# Altium footprint library Header_Pcb.PcbLib: 49 footprints (part 3 of 4)
Each footprint in its own frame and in the unit in brackets; x right, y up, seen from the top. Pads: shape width x height; smd on the part's side, far side on the other; paste and mask are expansions set on the pad; w line width, h text height; cw(c..) or ccw(c..) is an arc to the next point about the centre after c.
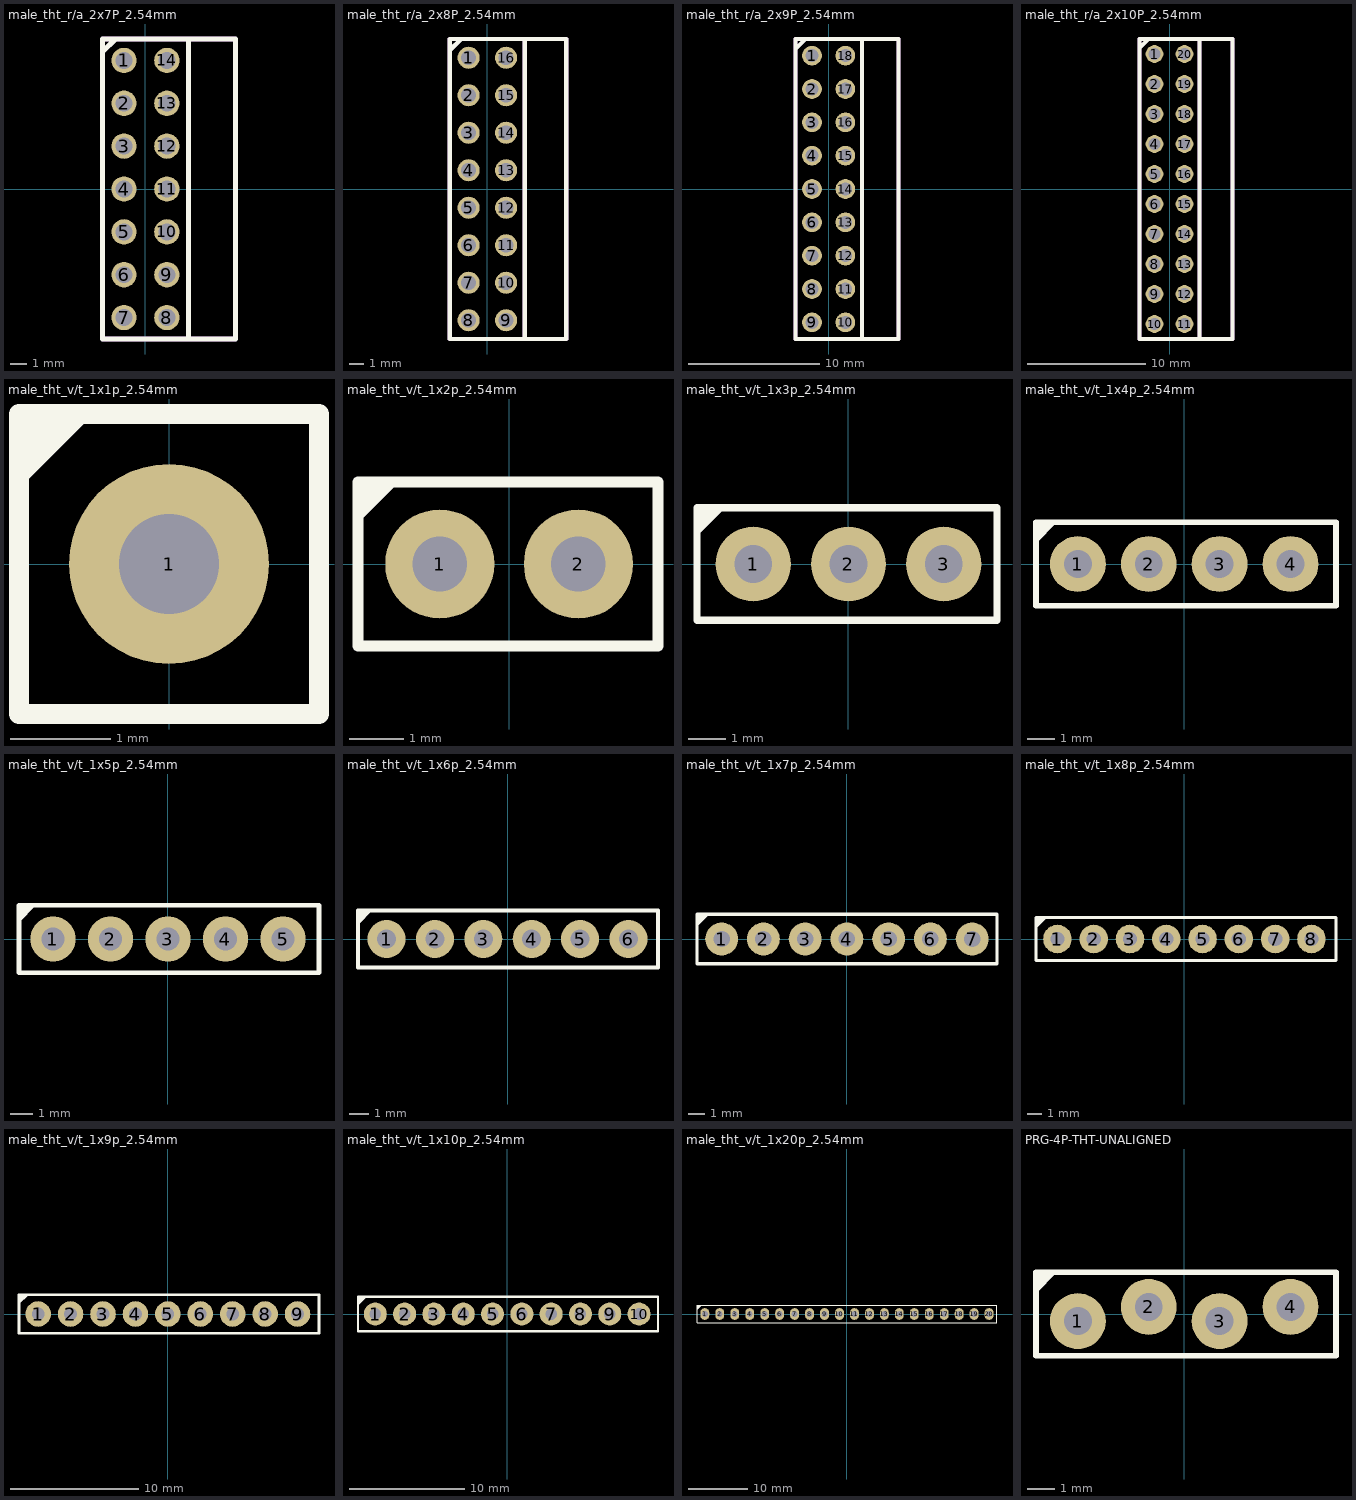
[diagram p2: the footprints below, top view; thin cyan lines are the x and y axes]

## male_tht_r/a_2x7P_2.54mm [mm]
pads (14):
  round 1.5 hole 1: 1(-1.27,7.62) 2(-1.27,5.08) 3(-1.27,2.54) 4(-1.27,0) 5(-1.27,-2.54) 6(-1.27,-5.08) 7(-1.27,-7.62) 8(1.27,-7.62) 9(1.27,-5.08) 10(1.27,-2.54) 11(1.27,0) 12(1.27,2.54) 13(1.27,5.08) 14(1.27,7.62)
Top Overlay:
  lines w0.3: -2.54,8.128 -1.778,8.89 ; 2.54,-8.89 5.334,-8.89 5.334,8.89 2.54,8.89 ; 2.54,-8.89 -2.54,-8.89 -2.54,8.89 2.54,8.89 ; 2.54,-8.89 2.54,8.89
Mechanical 13:
  lines w0.3: 2.54,-8.89 2.54,8.89 ; 2.54,8.89 -2.54,8.89 -2.54,-8.89 0,-8.89 5.334,-8.89 5.334,8.89 2.54,8.89
  text ".designator" at 1.078,-3.917 h1.5
3D body "male_90c_2x7P_2.54mm.step": height 6.77, standoff -5.99, extent -2.54,-8.89 5.54,8.89

## male_tht_r/a_2x8P_2.54mm [mm]
pads (16):
  round 1.5 hole 1: 1(-1.27,8.89) 2(-1.27,6.35) 3(-1.27,3.81) 4(-1.27,1.27) 5(-1.27,-1.27) 6(-1.27,-3.81) 7(-1.27,-6.35) 8(-1.27,-8.89) 9(1.27,-8.89) 10(1.27,-6.35) 11(1.27,-3.81) 12(1.27,-1.27) 13(1.27,1.27) 14(1.27,3.81) 15(1.27,6.35) 16(1.27,8.89)
Top Overlay:
  lines w0.3: -2.54,9.398 -1.778,10.16 ; 2.54,-10.16 5.334,-10.16 5.334,10.16 2.54,10.16 ; 2.54,-10.16 -2.54,-10.16 -2.54,10.16 2.54,10.16 ; 2.54,-10.16 2.54,10.16
Mechanical 13:
  lines w0.3: 2.54,-10.16 2.54,10.16 ; 2.54,10.16 -2.54,10.16 -2.54,-10.16 0,-10.16 5.334,-10.16 5.334,10.16 2.54,10.16
  text ".designator" at 1.078,-4.171 h1.5
3D body "male_90c_2x8P_2.54mm.step": height 6.77, standoff -5.99, extent -2.54,-10.16 5.54,10.16

## male_tht_r/a_2x9P_2.54mm [mm]
pads (18):
  round 1.5 hole 1: 1(-1.27,10.16) 2(-1.27,7.62) 3(-1.27,5.08) 4(-1.27,2.54) 5(-1.27,0) 6(-1.27,-2.54) 7(-1.27,-5.08) 8(-1.27,-7.62) 9(-1.27,-10.16) 10(1.27,-10.16) 11(1.27,-7.62) 12(1.27,-5.08) 13(1.27,-2.54) 14(1.27,0) 15(1.27,2.54) 16(1.27,5.08) 17(1.27,7.62) 18(1.27,10.16)
Top Overlay:
  lines w0.3: -2.54,10.668 -1.778,11.43 ; 2.54,-11.43 2.54,11.43 ; 2.54,-11.43 -2.54,-11.43 -2.54,11.43 2.54,11.43 ; 2.54,-11.43 5.334,-11.43 5.334,11.43 2.54,11.43
Mechanical 13:
  lines w0.3: 2.54,-11.43 2.54,11.43 ; 2.54,11.43 5.334,11.43 5.334,-11.43 0,-11.43 -2.54,-11.43 -2.54,11.43 2.54,11.43
  text ".designator" at 1.078,-4.425 h1.5
3D body "male_90c_2x9P_2.54mm.step": height 6.77, standoff -5.99, extent -2.54,-11.43 5.54,11.43

## male_tht_r/a_2x10P_2.54mm [mm]
pads (20):
  round 1.5 hole 1: 1(-1.27,11.43) 2(-1.27,8.89) 3(-1.27,6.35) 4(-1.27,3.81) 5(-1.27,1.27) 6(-1.27,-1.27) 7(-1.27,-3.81) 8(-1.27,-6.35) 9(-1.27,-8.89) 10(-1.27,-11.43) 11(1.27,-11.43) 12(1.27,-8.89) 13(1.27,-6.35) 14(1.27,-3.81) 15(1.27,-1.27) 16(1.27,1.27) 17(1.27,3.81) 18(1.27,6.35) 19(1.27,8.89) 20(1.27,11.43)
Top Overlay:
  lines w0.3: -2.54,11.938 -1.778,12.7 ; 2.54,-12.7 5.334,-12.7 5.334,12.7 2.54,12.7 ; 2.54,-12.7 -2.54,-12.7 -2.54,12.7 2.54,12.7 ; 2.54,-12.7 2.54,12.7
Mechanical 13:
  lines w0.3: 2.54,-12.7 2.54,12.7 ; 2.54,12.7 -2.54,12.7 -2.54,-12.7 0,-12.7 5.334,-12.7 5.334,12.7 2.54,12.7
  text ".designator" at 1.078,-4.425 h1.5
3D body "male_90c_2x10P_2.54mm.step": height 6.77, standoff -5.99, extent -2.54,-12.7 5.54,12.7

## male_tht_v/t_1x1p_2.54mm [mm]
pads (1):
  round 2 hole 1: 1(0,0)
Top Overlay:
  region: -1.5,1.5 -0.75,1.5 -1.5,0.75
  lines w0.2: -1.5,-1.5 -1.5,1.5 1.5,1.5 1.5,-1.5 -1.5,-1.5
3D body "sinle_1p.stp": height 8.55, standoff -2.99, extent -1.27,-1.27 1.27,1.27

## male_tht_v/t_1x2p_2.54mm [mm]
pads (2):
  round 2 hole 1: 1(-1.27,0) 2(1.27,0)
Top Overlay:
  region: -2.77,1.5 -2.02,1.5 -2.77,0.75
  lines w0.2: -2.77,-1.5 2.73,-1.5 2.73,1.5 -2.77,1.5 -2.77,-1.5
3D body "single_2p.stp": height 8.55, standoff -2.99, extent -2.56,-1.27 2.52,1.27

## male_tht_v/t_1x3p_2.54mm [mm]
pads (3):
  round 2 hole 1: 1(-2.54,0) 2(0,0) 3(2.54,0)
Top Overlay:
  region: -4.04,1.5 -3.29,1.5 -4.04,0.75
  lines w0.2: -4.04,-1.5 -4.04,1.5 3.96,1.5 3.96,-1.5 -4.04,-1.5
3D body "single_3p.stp": height 8.55, standoff -2.99, extent -3.81,-1.27 3.81,1.27

## male_tht_v/t_1x4p_2.54mm [mm]
pads (4):
  round 2 hole 1: 1(-3.81,0) 2(-1.27,0) 3(1.27,0) 4(3.81,0)
Top Overlay:
  region: -5.31,1.5 -4.56,1.5 -5.31,0.75
  lines w0.2: -5.31,-1.5 -5.31,1.5 5.44,1.5 5.44,-1.5 -5.31,-1.5
3D body "single_4p.stp": height 8.55, standoff -2.99, extent -5.08,-1.27 5.08,1.27

## male_tht_v/t_1x5p_2.54mm [mm]
pads (5):
  round 2 hole 1: 1(-5.08,0) 2(-2.54,0) 3(0,0) 4(2.54,0) 5(5.08,0)
Top Overlay:
  region: -6.58,1.5 -5.83,1.5 -6.58,0.75
  lines w0.2: -6.58,-1.5 -6.58,1.5 6.67,1.5 6.67,-1.5 -6.58,-1.5
3D body "single_5p.stp": height 8.55, standoff -2.99, extent -6.35,-1.27 6.35,1.27

## male_tht_v/t_1x6p_2.54mm [mm]
pads (6):
  round 2 hole 1: 1(-6.35,0) 2(-3.81,0) 3(-1.27,0) 4(1.27,0) 5(3.81,0) 6(6.35,0)
Top Overlay:
  region: -7.85,1.5 -7.1,1.5 -7.85,0.75
  lines w0.2: -7.85,-1.5 -7.85,1.5 7.9,1.5 7.9,-1.5 -7.85,-1.5
3D body "single_6p.stp": height 8.55, standoff -2.99, extent -7.62,-1.27 7.62,1.27

## male_tht_v/t_1x7p_2.54mm [mm]
pads (7):
  round 2 hole 1: 1(-7.62,0) 2(-5.08,0) 3(-2.54,0) 4(0,0) 5(2.54,0) 6(5.08,0) 7(7.62,0)
Top Overlay:
  region: -9.12,1.5 -8.37,1.5 -9.12,0.75
  lines w0.2: -9.12,-1.5 9.13,-1.5 9.13,1.5 -9.12,1.5 -9.12,-1.5
3D body "single_7p.stp": height 8.55, standoff -2.99, extent -8.89,-1.27 8.89,1.27

## male_tht_v/t_1x8p_2.54mm [mm]
pads (8):
  round 2 hole 1: 1(-8.89,0) 2(-6.35,0) 3(-3.81,0) 4(-1.27,0) 5(1.27,0) 6(3.81,0) 7(6.35,0) 8(8.89,0)
Top Overlay:
  region: -10.39,1.5 -9.64,1.5 -10.39,0.75
  lines w0.2: -10.39,-1.5 10.61,-1.5 10.61,1.5 -10.39,1.5 -10.39,-1.5
3D body "single_8p.stp": height 8.55, standoff -2.99, extent -10.16,-1.27 10.16,1.27

## male_tht_v/t_1x9p_2.54mm [mm]
pads (9):
  round 2 hole 1: 1(-10.16,0) 2(-7.62,0) 3(-5.08,0) 4(-2.54,0) 5(0,0) 6(2.54,0) 7(5.08,0) 8(7.62,0) 9(10.16,0)
Top Overlay:
  region: -11.66,1.5 -10.91,1.5 -11.66,0.75
  lines w0.2: -11.66,-1.5 -11.66,1.5 11.84,1.5 11.84,-1.5 -11.66,-1.5
3D body "single_9p.stp": height 8.55, standoff -2.99, extent -11.43,-1.27 11.43,1.27

## male_tht_v/t_1x10p_2.54mm [mm]
pads (10):
  round 2 hole 1: 1(-11.43,0) 2(-8.89,0) 3(-6.35,0) 4(-3.81,0) 5(-1.27,0) 6(1.27,0) 7(3.81,0) 8(6.35,0) 9(8.89,0) 10(11.43,0)
Top Overlay:
  region: -12.93,1.5 -12.18,1.5 -12.93,0.75
  lines w0.2: -12.93,-1.5 -12.93,1.5 13.07,1.5 13.07,-1.5 -12.93,-1.5
3D body "single_10p.stp": height 8.04, standoff -3.5, extent -12.55,-1.27 12.55,1.27

## male_tht_v/t_1x20p_2.54mm [mm]
pads (20):
  oval 1.5x2 hole 1: 1(-24.13,0) 2(-21.59,0) 3(-19.05,0) 4(-16.51,0) 5(-13.97,0) 6(-11.43,0) 7(-8.89,0) 8(-6.35,0) 9(-3.81,0) 10(-1.27,0) 11(1.27,0) 12(3.81,0) 13(6.35,0) 14(8.89,0) 15(11.43,0) 16(13.97,0) 17(16.51,0) 18(19.05,0) 19(21.59,0) 20(24.13,0)
Top Overlay:
  region: -25.425,1.449 -24.675,1.449 -25.425,0.699
  lines w0.2: -25.462,-1.5 25.477,-1.5 25.477,1.5 -25.462,1.5 -25.462,-1.5
3D body "single_10p.stp": height 8.04, standoff -3.5, extent 0.15,-1.27 25.25,1.27
3D body "single_10p.stp": height 8.04, standoff -3.5, extent -25.25,-1.27 -0.15,1.27

## PRG-4P-THT-UNALIGNED [mm]
pads (4):
  round 2 hole 1: 1(-3.81,-0.254) 2(-1.27,0.254) 3(1.27,-0.254) 4(3.81,0.254)
Top Overlay:
  region: -5.31,1.5 -4.56,1.5 -5.31,0.75
  lines w0.2: -5.31,-1.5 -5.31,1.5 5.44,1.5 5.44,-1.5 -5.31,-1.5
3D body "single_4p.stp": height 8.55, standoff -2.99, extent -5.08,-1.27 5.08,1.27